# Altium footprint library CoilcraftPCB.PcbLib: 320 footprints (part 11 of 20)
Each footprint in its own frame and in the unit in brackets; x right, y up, seen from the top. Pads: shape width x height; smd on the part's side, far side on the other; paste and mask are expansions set on the pad; w line width, h text height; cw(c..) or ccw(c..) is an arc to the next point about the centre after c.
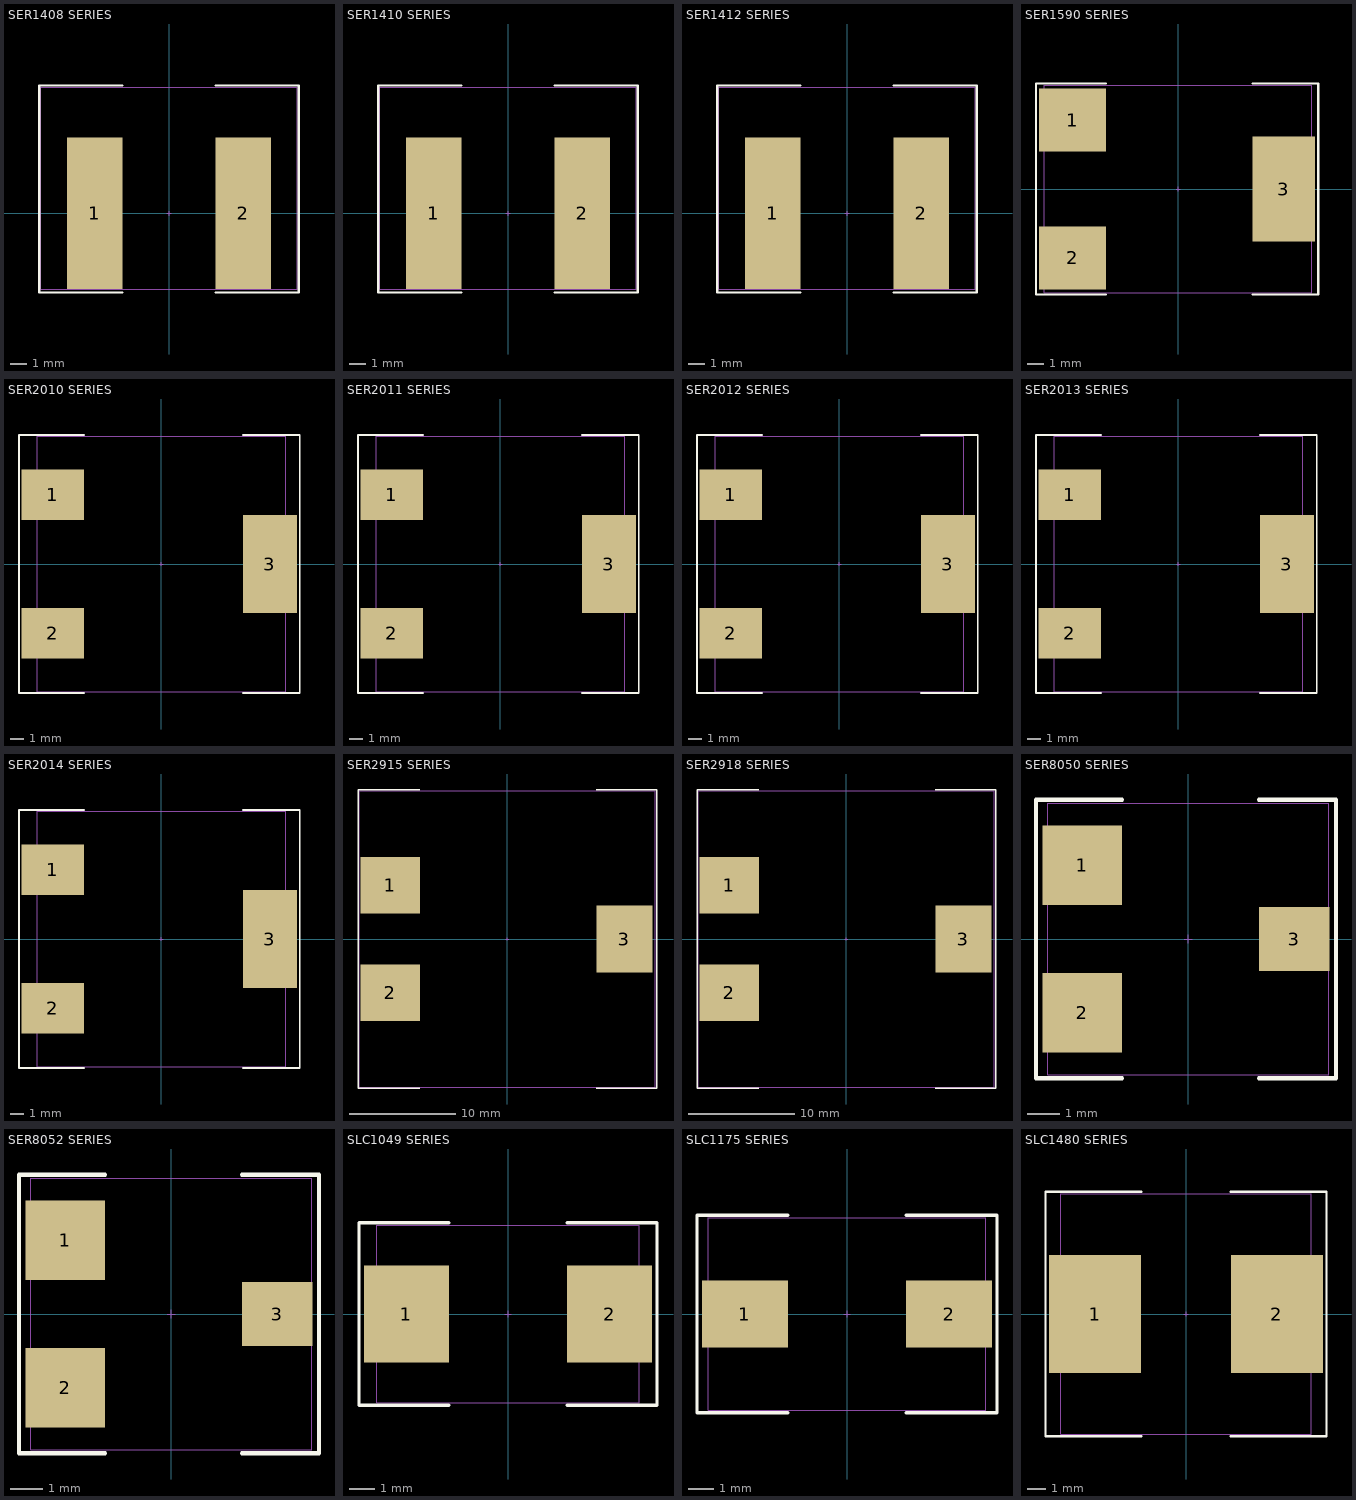
[diagram p10: the footprints below, top view; thin cyan lines are the x and y axes]

## SER1408 SERIES [mil] "Coilcraft Shielded Power Inductors"
height 325
pads (2):
  rect 130x355 smd: 1(-174,0) 2(174,0)
Top Overlay:
  lines w5: -109,-185 -304,-185 -304,299.5 -109,299.5 ; 109,-185 304,-185 304,299.5 109,299.5
Mechanical 13:
  lines w1: -5,0 5,0 ; 0,-5 0,5
Mechanical 14:
  lines w1: -300,-177.5 -300,295.5 300,295.5 300,-177.5 -300,-177.5
3D body: height 325.83, standoff 0.59, extent -300,-182.39 300,299.5

## SER1410 SERIES [mil] "Coilcraft Shielded Power Inductors"
height 416
pads (2):
  rect 130x355 smd: 1(-174,0) 2(174,0)
Top Overlay:
  lines w5: -109,-185 -304,-185 -304,299.5 -109,299.5 ; 109,-185 304,-185 304,299.5 109,299.5
Mechanical 13:
  lines w1: -5,0 5,0 ; 0,-5 0,5
Mechanical 14:
  lines w1: -300,-177.5 300,-177.5 300,295.5 -300,295.5 -300,-177.5
3D body: height 416.38, standoff 0.59, extent -300,-182.39 300,299.5

## SER1412 SERIES [mil] "Coilcraft Shielded Power Inductors"
height 498
pads (2):
  rect 130x355 smd: 1(-174,0) 2(174,0)
Top Overlay:
  lines w5: -109,-185 -304,-185 -304,299.5 -109,299.5 ; 109,-185 304,-185 304,299.5 109,299.5
Mechanical 13:
  lines w1: -5,0 5,0 ; 0,-5 0,5
Mechanical 14:
  lines w1: -300,-177.5 -300,295.5 300,295.5 300,-177.5 -300,-177.5
3D body: height 499.06, standoff 0, extent -300,-182.48 300,300

## SER1590 SERIES [mil] "Coilcraft Shielded Power Inductors"
height 400
pads (3):
  rect 160x150 smd: 1(-252.5,165) 2(-252.5,-165)
  rect 150x250 smd: 3(252.5,0)
Top Overlay:
  lines w5: -172.5,-252 -340,-252 -340,252 -172.5,252 ; 177.5,-252 335,-252 335,251.98 177.5,252
Mechanical 13:
  lines w1: -5,0 5,0 ; 0,-5 0,5
Mechanical 14:
  lines w1: -320,-248 320,-248 320,248 -320,248 -320,-248
3D body: height 400.16, standoff 0.16, extent -335.04,-310.04 305.11,310.04

## SER2010 SERIES [mil] "Coilcraft Shielded Power Inductors"
height 370
pads (3):
  rect 185x150 smd: 1(-321.25,205) 2(-321.25,-205)
  rect 160x290 smd: 3(321.25,0)
Top Overlay:
  lines w5: -228.5,-381.5 -421.5,-381.5 -421.5,381.51 -228.5,381.51 ; 241,-381.5 409,-381.5 409,381.48 241,381.51
Mechanical 13:
  lines w1: -5,0 5,0 ; 0,-5 0,5
Mechanical 14:
  lines w1: -368,-377.5 -368,377.5 368,377.5 368,-377.5 -368,-377.5
3D body: height 384.02, standoff 0, extent -411.81,-387.6 324.41,387.59

## SER2011 SERIES [mil] "Coilcraft Shielded Power Inductors"
height 420
pads (3):
  rect 185x150 smd: 1(-321.25,205) 2(-321.25,-205)
  rect 160x290 smd: 3(321.25,0)
Top Overlay:
  lines w5: -228.5,-381.5 -421.5,-381.5 -421.5,381.51 -228.5,381.51 ; 241,-381.5 409,-381.5 409,381.48 241,381.51
Mechanical 13:
  lines w1: -5,0 5,0 ; 0,-5 0,5
Mechanical 14:
  lines w1: -368,-377.5 -368,377.5 368,377.5 368,-377.5 -368,-377.5
3D body: height 425.24, standoff -0.31, extent -411.81,-387.6 324.41,387.59

## SER2012 SERIES [mil] "Coilcraft Shielded Power Inductors"
height 470
pads (3):
  rect 185x150 smd: 1(-321.25,205) 2(-321.25,-205)
  rect 160x290 smd: 3(321.25,0)
Top Overlay:
  lines w5: -228.5,-381.5 -421.5,-381.5 -421.5,381.51 -228.5,381.51 ; 241,-381.5 409,-381.5 409,381.48 241,381.51
Mechanical 13:
  lines w1: -5,0 5,0 ; 0,-5 0,5
Mechanical 14:
  lines w1: -368,-377.5 368,-377.5 368,377.5 -368,377.5 -368,-377.5
3D body: height 472.24, standoff 1.06, extent -411.81,-387.6 324.41,387.59

## SER2013 SERIES [mil] "Coilcraft Shielded Power Inductors"
height 510
pads (3):
  rect 185x150 smd: 1(-321.25,205) 2(-321.25,-205)
  rect 160x290 smd: 3(321.25,0)
Top Overlay:
  lines w5: -228.5,-381.5 -421.5,-381.5 -421.5,381.51 -228.5,381.51 ; 241,-381.5 409,-381.5 409,381.48 241,381.51
Mechanical 13:
  lines w1: -5,0 5,0 ; 0,-5 0,5
Mechanical 14:
  lines w1: -368,-377.5 -368,377.5 368,377.5 368,-377.5 -368,-377.5
3D body: height 530, standoff -0.18, extent -411.81,-387.6 324.41,387.59

## SER2014 SERIES [mil] "Coilcraft Shielded Power Inductors"
height 550
pads (3):
  rect 185x150 smd: 1(-321.25,205) 2(-321.25,-205)
  rect 160x290 smd: 3(321.25,0)
Top Overlay:
  lines w5: -228.5,-381.5 -421.5,-381.5 -421.5,381.51 -228.5,381.51 ; 241,-381.5 409,-381.5 409,381.48 241,381.51
Mechanical 13:
  lines w1: -5,0 5,0 ; 0,-5 0,5
Mechanical 14:
  lines w1: -368,-377.5 368,-377.5 368,377.5 -368,377.5 -368,-377.5
3D body: height 550.16, standoff 0.55, extent -411.81,-387.6 324.41,387.59

## SER2915 SERIES [mil] "Coilcraft Shielded Power Inductors"
height 605
pads (3):
  rect 220x210 smd: 1(-434.5,200) 2(-434.5,-200)
  rect 208x250 smd: 3(434.5,0)
Top Overlay:
  lines w5: -554,554 -324.5,554 ; -554,554.1 -554,-554 -324.5,-554 ; 330.5,-554 554,-554 554,554.02 330.5,554
Mechanical 13:
  lines w1: -5,0 5,0 ; 0,-5 0,5
Mechanical 14:
  lines w1: -550,-550 -550,550 550,550 550,-550 -550,-550
3D body: height 604.99, standoff 0.27, extent -537.22,-549.5 561.22,549

## SER2918 SERIES [mil] "Coilcraft Shielded Power Inductors"
height 700
pads (3):
  rect 220x210 smd: 1(-434.5,200) 2(-434.5,-200)
  rect 208x250 smd: 3(434.5,0)
Top Overlay:
  lines w5: -554,554 -324.5,554 ; -554,554.1 -554,-554 -324.5,-554 ; 330.5,-554 554,-554 554,554.02 330.5,554
Mechanical 13:
  lines w1: -5,0 5,0 ; 0,-5 0,5
Mechanical 14:
  lines w1: -550,-550 -550,550 550,550 550,-550 -550,-550
3D body: height 700.27, standoff 0.27, extent -532.46,-549.25 565.98,549.25

## SER8050 SERIES [mil] "Coilcraft Shielded Power Inductors"
height 197
pads (3):
  rect 98x98 smd: 1(-130.75,91) 2(-130.75,-91)
  rect 87x79 smd: 3(130.75,0)
Top Overlay:
  lines w5: -81.5,-171.5 -187.5,-171.5 -187.5,171.5 -81.5,171.5 ; 87,-171.5 182,-171.5 182,171.5 87,171.5
Mechanical 13:
  lines w1: -5,0 5,0 ; 0,-5 0,5
Mechanical 14:
  lines w1: -173,-167.5 -173,167.5 173,167.5 173,-167.5 -173,-167.5
3D body: height 196.91, standoff 0.06, extent -173.23,-167.32 173.23,167.32

## SER8052 SERIES [mil] "Coilcraft Shielded Power Inductors"
height 205
pads (3):
  rect 98x98 smd: 1(-130.75,91) 2(-130.75,-91)
  rect 87x79 smd: 3(130.75,0)
Top Overlay:
  lines w5: -81.5,-171.5 -187.5,-171.5 -187.5,171.5 -81.5,171.5 ; 87,-171.5 182,-171.5 182,171.5 87,171.5
Mechanical 13:
  lines w1: -5,0 5,0 ; 0,-5 0,5
Mechanical 14:
  lines w1: -173,-167.5 173,-167.5 173,167.5 -173,167.5 -173,-167.5
3D body: height 204.79, standoff 0.06, extent -173.23,-167.32 173.23,167.32

## SLC1049 SERIES [mil] "Coilcraft Shielded Power Inductors"
height 203
pads (2):
  rect 130x148 smd: 1(-155.5,0) 2(155.5,0)
Top Overlay:
  lines w5: -90.5,-139.5 -228,-139.5 -228,139.5 -90.5,139.5 ; 90.5,-139.5 228,-139.5 228,139.5 90.5,139.5
Mechanical 13:
  lines w1: -5,0 5,0 ; 0,-5 0,5
Mechanical 14:
  lines w1: -200.5,-135.5 -200.5,135.5 200.5,135.5 200.5,-135.5 -200.5,-135.5
3D body: height 204.21, standoff 1.06, extent -198.82,-135.44 200.79,135.43

## SLC1175 SERIES [mil] "Coilcraft Shielded Power Inductors"
height 283
pads (2):
  rect 132x102 smd: 1(-156.5,0) 2(156.5,0)
Top Overlay:
  lines w5: -90.5,-151.5 -230,-151.5 -230,151.5 -90.5,151.5 ; 90.5,-151.5 230,-151.5 230,151.5 90.5,151.5
Mechanical 13:
  lines w1: -5,0 5,0 ; 0,-5 0,5
Mechanical 14:
  lines w1: -212.5,-147.5 212.5,-147.5 212.5,147.5 -212.5,147.5 -212.5,-147.5
3D body: height 283, standoff 0, extent -212.5,-147.5 212.5,147.5

## SLC1480 SERIES [mil] "Coilcraft Shielded Power Inductors"
height 315
pads (2):
  rect 195x250 smd: 1(-192.5,0) 2(192.5,0)
Top Overlay:
  lines w5: -95,-259 -297.5,-259 -297.5,259 -95,259 ; 95,-259 297.5,-259 297.5,259 95,259
Mechanical 13:
  lines w1: -5,0 5,0 ; 0,-5 0,5
Mechanical 14:
  lines w1: -265,-255 265,-255 265,255 -265,255 -265,-255
3D body: height 300.28, standoff 1.06, extent -264.96,-254.92 264.96,254.92